# Altium schematic symbol library 1049P.SchLib: 1 symbol
Pins are listed as number, name and electrical type; pins without a type are passive.

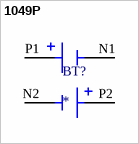
[diagram p0: symbol 1049P]

## 1049P
designator BT?
MF: Keystone Electronics; MP: 1049P; Package: None; Price: None; Value: *; Availability: Unavailable
footprint BAT_1049P
pins: N1 NEG1, N2 NEG2, P1 POS1, P2 POS2